# Altium footprint library Mechanical.PcbLib: 40 footprints (part 3 of 3)
Each footprint in its own frame and in the unit in brackets; x right, y up, seen from the top. Pads: shape width x height; smd on the part's side, far side on the other; paste and mask are expansions set on the pad; w line width, h text height; cw(c..) or ccw(c..) is an arc to the next point about the centre after c.
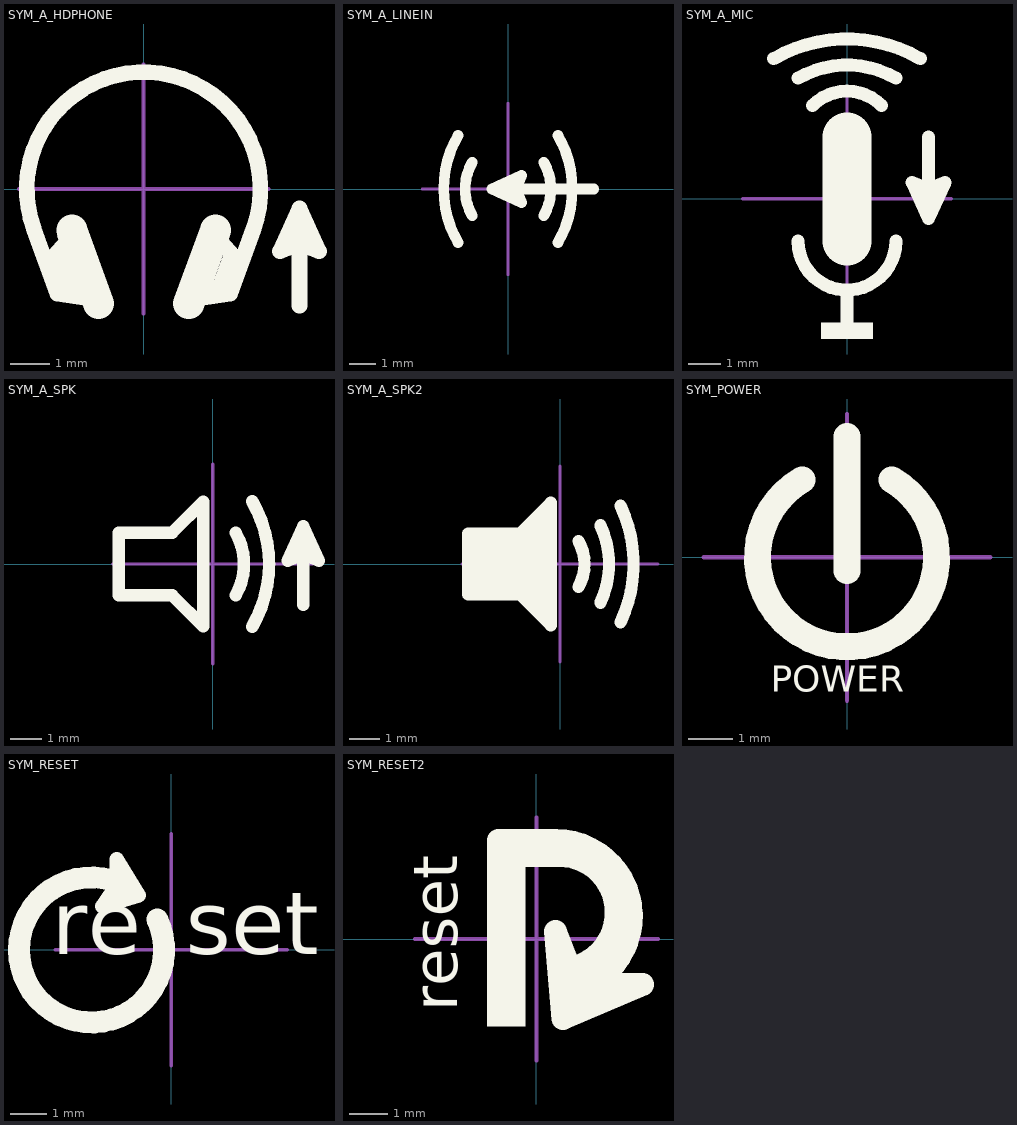
[diagram p2: the footprints below, top view; thin cyan lines are the x and y axes]

## SYM_A_HDPHONE [mm] "Symbol, Audio, HeadPhone"
Top Overlay:
  lines w0.4: -2.489,-1.934 -1.808,-1.154 ; -2.258,-1.67 -1.893,-2.675 ; -1.192,-2.846 -2.215,-2.686 -2.819,-1.026 cw(c0,0) 2.819,-1.026 2.215,-2.686 1.192,-2.846 ; 1.808,-1.154 2.489,-1.934 ; 1.893,-2.675 2.258,-1.67 ; 4,-3 4,-0.5 ; 4,-0.5 4.5,-1.6 4,-1.4 3.5,-1.6 4,-0.5
  lines w0.8: -1.842,-1.06 -1.158,-2.94 ; 1.158,-2.94 1.842,-1.06
Mechanical 1:
  lines w0.1: -3.2,0 3.2,0 ; 0,-3.2 0,3.2

## SYM_A_LINEIN [mm] "Symbol, Audio, LineIN"
Top Overlay:
  lines w0.4: -1.864,-2 cw(c1.6,0) -1.864,2 ; -1.332,-1 cw(c0.4,0) -1.332,1 ; 1.332,-1 ccw(c-0.4,0) 1.332,1 ; 1.864,-2 ccw(c-1.6,0) 1.864,2 ; 3.2,0 -0.6,0 ; -0.6,0 0.5,-0.5 0.3,0 0.5,0.5 -0.6,0
Mechanical 1:
  lines w0.1: -3.2,0 3.2,0 ; 0,-3.2 0,3.2

## SYM_A_MIC [mm] "Symbol, Audio, Microphone, 6X9.5mm"
Top Overlay:
  rectangle: -0.8,-4.3 0.8,-3.8
  lines w0.4: -2.25,4.297 cw(c0,0.4) 2.25,4.297 ; -1.5,-1.3 ccw(c0,-1.3) 1.5,-1.3 ; -1.5,3.698 cw(c0,1.1) 1.5,3.698 ; -1.061,2.861 cw(c0,1.8) 1.061,2.861 ; 0,-3.8 0,-2.8 ; 2.5,1.9 2.5,-0.6 ; 2.5,-0.6 3,0.5 2.5,0.3 2,0.5 2.5,-0.6
  lines w1.5: 0,-1.3 0,1.9
Mechanical 1:
  lines w0.1: -3.2,0 3.2,0 ; 0,-3.2 0,3.2

## SYM_A_SPK [mm] "Symbol, Audio, Speaker"
Top Overlay:
  lines w0.4: 0.732,-1 ccw(c-1,0) 0.732,1 ; 1.264,-2 ccw(c-2.2,0) 1.264,2 ; 2.9,-1.3 2.9,1.2 ; 2.9,1.2 2.4,0.1 2.9,0.3 3.4,0.1 2.9,1.2 ; -3,-1 -3,1 -1.3,1 -0.3,2 -0.3,-2 -1.3,-1 -3,-1
Mechanical 1:
  lines w0.1: -3.2,0 3.2,0 ; 0,-3.2 0,3.2

## SYM_A_SPK2 [mm] "Symbol, Audio, Speaker Full"
Top Overlay:
  region: -0.3,2 -1.3,1 -3,1 -3,-1 -1.3,-1 -0.3,-2
  lines w0.4: 0.599,-0.75 ccw(c-0.7,0) 0.599,0.75 ; 1.319,-1.268 ccw(c-1.4,0) 1.319,1.268 ; 1.978,-1.902 ccw(c-2.1,0) 1.978,1.902 ; -3,-1 -1.3,-1 -0.3,-2 -0.3,2 -1.3,1 -3,1 -3,-1
Mechanical 1:
  lines w0.1: -3.2,0 3.2,0 ; 0,-3.2 0,3.2

## SYM_POWER [mm] "Symbol, POWER, 4.6X6.3mm"
Top Overlay:
  lines w0.6: -1,1.732 ccw(c0,0) 1,1.732 ; 0,-0.3 0,2.7
  text "POWER" at -1.7,-3.2 h1
Mechanical 1:
  lines w0.1: -3.2,0 3.2,0 ; 0,-3.2 0,3.2

## SYM_RESET [mm] "Symbol, RESET, 8.8x5mm"
Top Overlay:
  lines w0.4: -1.9,1.2 -1.5,1.8 -1.5,2.5 -0.9,1.5 -1.9,1.2
  lines w0.6: -1.2,1.732 ccw(c-2.2,0) -0.387,0.845
  text "set" at 0.4,-0.7 h3
  text "re" at -3.3,-0.7 h3
Mechanical 1:
  lines w0.1: -3.2,0 3.2,0 ; 0,-3.2 0,3.2

## SYM_RESET2 [mm] "Symbol, RESET, 5.4x6.3mm"
Top Overlay:
  region: -1.3,-2.3 -1.3,2.1 -0.3,2.1 -0.3,-2.3
  lines w0.6: -1,-2 -1,2.6 0.5,2.6 cw(c0.5,0.6) 1.5,-1.132 ; -0.8,2.2 0.7,2.2 ; 0.6,-0.8 ccw(c0.6,0.7) 0.6,2.2 ; 1.2,-1.6 0.5,0.2 0.7,-2.1 2.8,-1.2 1.3,-1.2
  text "reset" at -1.7,-1.9 h2
Mechanical 1:
  lines w0.1: -3.2,0 3.2,0 ; 0,-3.2 0,3.2